# Altium footprint library CONN_SD-43045-005_06_MOL.PcbLib: 1 footprints
Each footprint in its own frame and in the unit in brackets; x right, y up, seen from the top. Pads: shape width x height; smd on the part's side, far side on the other; paste and mask are expansions set on the pad; w line width, h text height; cw(c..) or ccw(c..) is an arc to the next point about the centre after c.
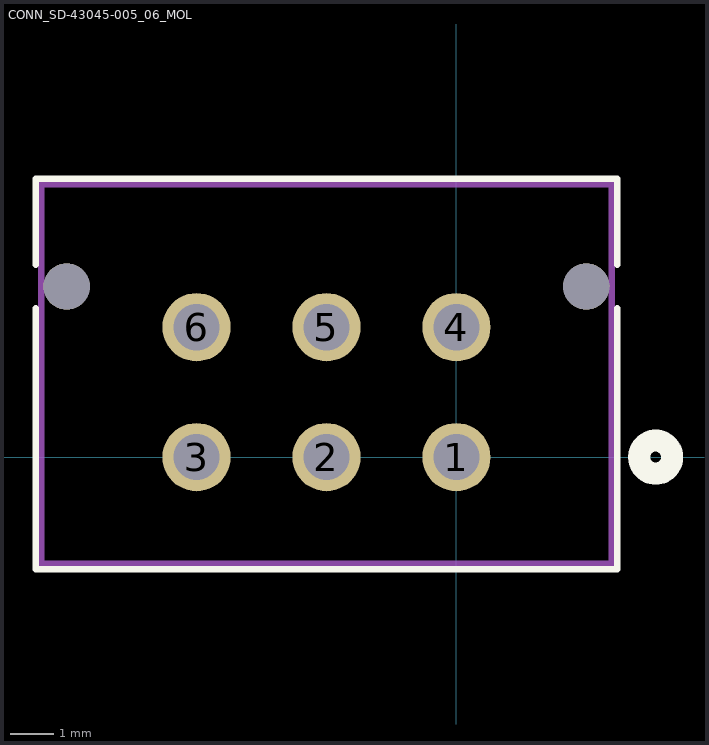
[diagram p0: the footprint, top view; thin cyan lines are the x and y axes]

## CONN_SD-43045-005_06_MOL [mil]
pads (8):
  round 62 hole 42 mask+4.02: 1(0,0) 2(-118,0) 3(-236,0) 4(0,118) 5(-118,118) 6(-236,118)
  round 42 hole 42 unplated mask+0: ""(-354,155) ""(118,155)
Top Overlay:
  lines w6: -382,135 -382,-102 146,-102 146,135 ; -382,175 -382,253 146,253 146,175
  lines w20: 166,0 ccw(c181,0) 196,0 ccw(c181,0) 166,0
Bottom Overlay:
  lines w20: 166,0 ccw(c181,0) 196,0 ccw(c181,0) 166,0
Assembly Top:
  lines w6: -377,-97 141,-97 141,248 -377,248 -377,-97
  lines w20: -15,0 ccw(c0,0) 15,0 ccw(c0,0) -15,0